# Altium schematic symbol library Diodes.SchLib: 13 symbols
Pins are listed as number, name and electrical type; pins without a type are passive.

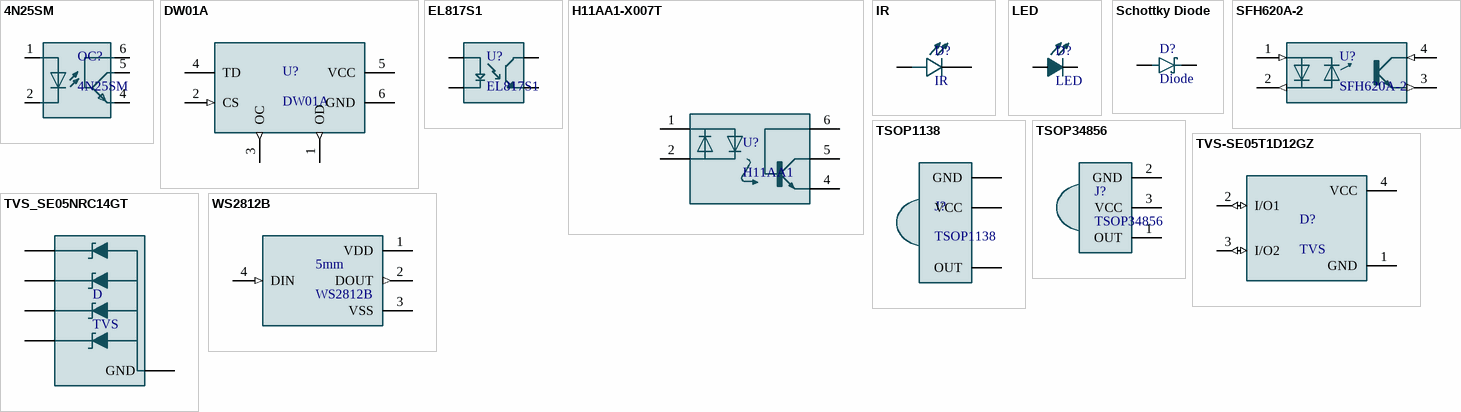
[diagram p0: symbols 4N25SM to WS2812B]

## 4N25SM
designator OC?
Optoisolator Transistor with Base Output 4170Vrms 1 Channel 6-SMD; MF: ON Semiconductor; MP: 4N25SM; Availability: Unavailable; SnapEDA_Link: https://www.snapeda.com/parts/4N25SM/ON%20Semiconductor/view-part/2630074/?ref=snap; Package: SMD-6 ON Semiconductor; Value: *; Price: None
footprint 4N25SM
pins: 1 A, 2 C, 4 EMI, 5 COL, 6 BAS

## DW01A
designator U?
One Cell Lithium-ion/Polymer Battery Protection IC; MF: Fortune Semiconductor; SnapEDA_Link: https://www.snapeda.com/parts/DW01A/Fortune+Semiconductor/view-part/?ref=snap; Package: SOT-23-6 Fortune Semiconductor; Value: *; MP: DW01A; Check_prices: https://www.snapeda.com/parts/DW01A/Fortune+Semiconductor/view-part/?ref=eda
footprint DW01A (SOT95P280X145-6N)
pins: 1 OD (out), 2 CS (in), 3 OC (out), 4 TD, 5 VCC (power), 6 GND (power)

## EL817S1
designator U?
Optoisolator Transistor Output 5000Vrms 1 Channel 4-SMD; MF: Everlight Electronics; MP: EL817S1(C)(TU); SnapEDA_Link: https://www.snapeda.com/parts/EL817S1(C)(TU)/Everlight/view-part/?ref=snap; Package: NON STANDARD-4 Everlight; Value: *; Check_prices: https://www.snapeda.com/parts/EL817S1(C)(TU)/Everlight/view-part/?ref=eda
footprint EL817S1 (SOIC254P1030X390-4N)
pins: 1 A, 2 C, 3 ET, 4 CT

## H11AA1-X007T
designator U?, comment H11AA1
H11AA1 Series Single Channel 30V 5300 Vrms SMT Phototransistor Optocoupler DIP-6; MF: Vishay Semiconductor; MP: H11AA1-X007T; SnapEDA_Link: https://www.snapeda.com/parts/H11AA1-X007T/Vishay/view-part/?ref=snap; Package: SMD-6 Vishay; Value: *; Check_prices: https://www.snapeda.com/parts/H11AA1-X007T/Vishay/view-part/?ref=eda
footprint H11AA1 (SOIC254P1030X460-6N)
pins: 1 A/C, 2 C/A, 4 E, 5 C, 6 B

## IR
designator D?
5MM IR TRANSMITTER; MF: OSRAM Opto; MP: SFH 203; Package: Radial Osram Opto; Value: *; Price: None; SnapEDA_Link: https://www.snapeda.com/parts/SFH%20203/OSRAM%20Opto%20Semiconductors%20Inc./view-part/148547/?ref=snap; Availability: Unavailable
footprint IR-5mm (Photodiode-IR-5mm)
pins: 1 A, 2 C

## LED
designator D?
MP: LTW-C191TLA; Package: None; Availability: Unavailable; Value: LED; Price: None
footprint LED0603 (LEDC1608X65N)
footprint LED1206 (LEDC3115X65N)
footprint LED3mm
pins: A, C

## Schottky Diode
designator D?, comment Diode
Schottky Diode; MF: Diotec Semiconductor; MP: S1M; Value: *; Price: None; Package: DO-214AC-2 Diotec; Availability: In Stock; SnapEDA_Link: https://www.snapeda.com/parts/S1M/Diotec/view-part/?ref=snap; Purchase-URL: https://pricing.snapeda.com/search/part/S1M/?ref=eda; Check_prices: https://www.snapeda.com/parts/S1M/Diotec/view-part/?ref=eda
footprint SS36 (DO-214AC (SMA))
footprint MBR0520LT3G (SOD3716X135N)
pins: A, C K

## SFH620A-2
designator U?
Optoisolator Transistor Output 5300Vrms 1 Channel 4-DIP; MF: Vishay Semiconductor; SnapEDA_Link: https://www.snapeda.com/parts/SFH620A-2/Vishay/view-part/?ref=snap; Package: DIP-4 Vishay Semiconductor; Value: *; MP: SFH620A-2; Check_prices: https://www.snapeda.com/parts/SFH620A-2/Vishay/view-part/?ref=eda
footprint SFH620A-2 (PDIP-4)
pins: 1 (in), 2 (out), 3 (out), 4 (in)

## TSOP1138
designator J?
Ir Receiver, 45m, 950nm, Through Hole; MF: Vishay; MP: TSOP1138.; SnapEDA_Link: https://www.snapeda.com/parts/TSOP1138./Vishay/view-part/?ref=snap; Package: None; Value: *; Check_prices: https://www.snapeda.com/parts/TSOP1138./Vishay/view-part/?ref=eda
footprint TSOP1138
pins: GND, OUT, VCC

## TSOP34856
designator J?
Remote Receiver Sensor 38.0kHz 45m Through Hole; MF: Vishay; MP: TSOP38238; SnapEDA_Link: https://www.snapeda.com/parts/TSOP38238/Vishay+Semiconductor+Opto+Division/view-part/?ref=snap; Package: None; Value: *; Check_prices: https://www.snapeda.com/parts/TSOP38238/Vishay+Semiconductor+Opto+Division/view-part/?ref=eda
footprint TSOP34856
pins: 1 OUT, 2 GND (power), 3 VCC (power)

## TVS-SE05T1D12GZ
designator D?, comment TVS
ESD Suppressor Diode TVS Uni-Dir 5.5V 17Vc 4-Pin SOT-143 T/R; MF: Diodes Inc.; MP: DRTR5V0U2SR-7; Price: None; Purchase-URL: https://pricing.snapeda.com/search/part/DRTR5V0U2SR-7/?ref=eda; Check_prices: https://www.snapeda.com/parts/DRTR5V0U2SR-7/Diodes+Inc./view-part/?ref=eda; Value: *; SnapEDA_Link: https://www.snapeda.com/parts/DRTR5V0U2SR-7/Diodes+Inc./view-part/?ref=snap; Availability: In Stock; Package: SOT-143 Diodes Inc.
footprint TVS_SE05NRC14GT (SOT-143)
pins: 1 GND (power), 2 I/O1 (io), 3 I/O2 (io), 4 VCC (power)

## TVS_SE05NRC14GT
designator D, comment TVS
ESD8104MUTAG, Quad Uni-Directional ESD Protection Diode, 10-Pin UDFN; MF: ON Semiconductor; MP: ESD8104MUTAG; Availability: Unavailable; Price: None; SnapEDA_Link: https://www.snapeda.com/parts/ESD8104MUTAG/ON%20Semiconductor/view-part/220668/?ref=snap; Package: UDFN-10 ON Semiconductor; Value: *; DigiKey-Purchase-URL: https://snapeda.com/shop?store=DigiKey&id=220668
footprint TVS-SE05T1D12GZ (DFN2510)
pins: 1 I/O_1, 2 I/O_2, 3 GND (power), 4 I/O_4, 5 I/O_5

## WS2812B
designator 5mm
Intelligent control LED integrated light source; MP: WS2812B-B; Availability: Unavailable; Price: None; Package: None; Value: *
footprint WS2812B-5050 (LED_WS2812B_5050)
pins: 1 VDD (power), 2 DOUT (out), 3 VSS (power), 4 DIN (in)